# Altium schematic symbol library mySchlib.SchLib: 7 symbols
Pins are listed as number, name and electrical type; pins without a type are passive.

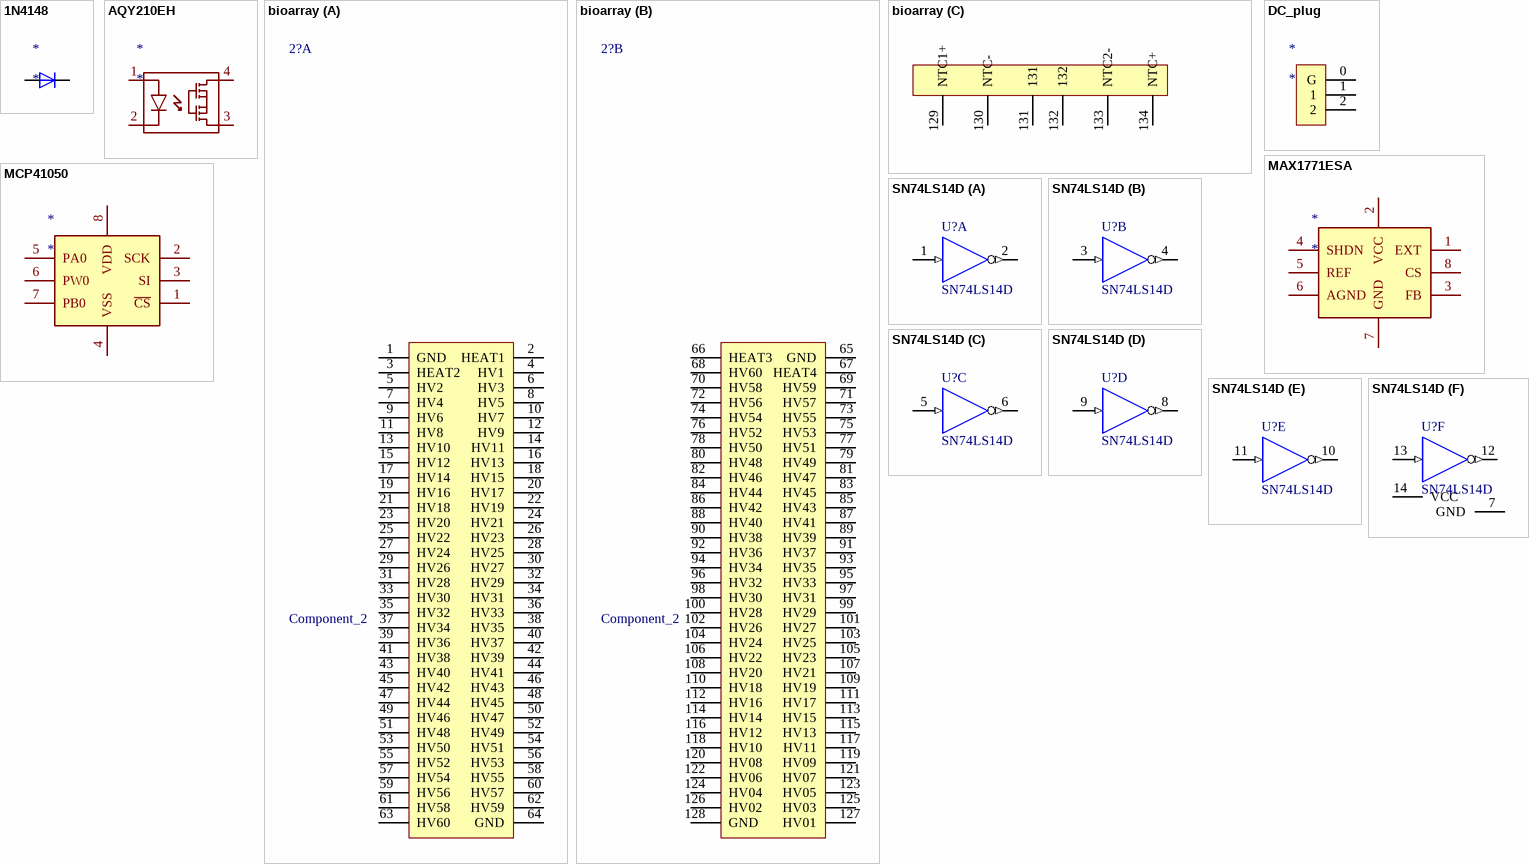
[diagram p0: symbols 1N4148 to SN74LS14D]

## 1N4148
designator *
pins: 1 K, 2 A

## AQY210EH
designator *
pins: 1 A, 2 A, 3 A, 4 A

## bioarray
designator 2?, comment Component_2
footprint PCBComponent_2
footprint PCBComponent_1
part A pins: 1 GND, 2 HEAT1, 3 HEAT2, 4 HV1, 5 HV2, 6 HV3, 7 HV4, 8 HV5, 9 HV6, 10 HV7, 11 HV8, 12 HV9, 13 HV10, 14 HV11, 15 HV12, 16 HV13, 17 HV14, 18 HV15, 19 HV16, 20 HV17, 21 HV18, 22 HV19, 23 HV20, 24 HV21, 25 HV22, 26 HV23, 27 HV24, 28 HV25, 29 HV26, 30 HV27, 31 HV28, 32 HV29, 33 HV30, 34 HV31, 35 HV32, 36 HV33, 37 HV34, 38 HV35, 39 HV36, 40 HV37, 41 HV38, 42 HV39, 43 HV40, 44 HV41, 45 HV42, 46 HV43, 47 HV44, 48 HV45, 49 HV46, 50 HV47, 51 HV48, 52 HV49, 53 HV50, 54 HV51, 55 HV52, 56 HV53, 57 HV54, 58 HV55, 59 HV56, 60 HV57, 61 HV58, 62 HV59, 63 HV60, 64 GND
part B pins: 65 GND, 66 HEAT3, 67 HEAT4, 68 HV60, 69 HV59, 70 HV58, 71 HV57, 72 HV56, 73 HV55, 74 HV54, 75 HV53, 76 HV52, 77 HV51, 78 HV50, 79 HV49, 80 HV48, 81 HV47, 82 HV46, 83 HV45, 84 HV44, 85 HV43, 86 HV42, 87 HV41, 88 HV40, 89 HV39, 90 HV38, 91 HV37, 92 HV36, 93 HV35, 94 HV34, 95 HV33, 96 HV32, 97 HV31, 98 HV30, 99 HV29, 100 HV28, 101 HV27, 102 HV26, 103 HV25, 104 HV24, 105 HV23, 106 HV22, 107 HV21, 108 HV20, 109 HV19, 110 HV18, 111 HV17, 112 HV16, 113 HV15, 114 HV14, 115 HV13, 116 HV12, 117 HV11, 118 HV10, 119 HV09, 120 HV08, 121 HV07, 122 HV06, 123 HV05, 124 HV04, 125 HV03, 126 HV02, 127 HV01, 128 GND
part C pins: 129 NTC1+, 130 NTC-, 131, 132, 133 NTC2-, 134 NTC+

## DC_plug
designator *
pins: 0 G, 1, 2

## MAX1771ESA
designator *
pins: 1 EXT, 2 VCC, 3 FB, 4 SHDN, 5 REF, 6 AGND, 7 GND, 8 CS

## MCP41050
designator *
pins: 1 ~{CS}, 2 SCK, 3 SI, 4 VSS, 5 PA0, 6 PW0, 7 PB0, 8 VDD

## SN74LS14D
designator U?
Hex Schmitt-Trigger Inverter; Published: 8-Jun-2000; LatestRevisionDate: 13-Apr-2006; LatestRevisionNote: IPC-7351 Footprint Added.; DatasheetVersion: Mar-1988; PackageVersion: Jan-1998; PackageReference: D014; Publisher: Altium Limited; PackageDescription: 14-Pin Small Outline Integrated Circuit 1.27 mm Pitch; Code_IPC: SOIC127P600-14; ComponentLink1Description: Manufacturer Link; ComponentLink1URL: http://www.ti.com/; ComponentLink2Description: Datasheet; ComponentLink2URL: http://www-s.ti.com/sc/ds/sn74ls14.pdf
footprint D014_N (SOIC, 14-Leads, Body 8.7x3.9mm, Pitch 1.27mm, IPC Medium Density)
footprint D014_L (SOIC, 14-Leads, Body 8.7x3.9mm, Pitch 1.27mm, IPC High Density)
footprint D014_M (SOIC, 14-Leads, Body 8.7x3.9mm, Pitch 1.27mm, IPC Low Density)
3D model D014 (14-Pin Small Outline Integrated Circuit 1.27 mm Pitch)
simulation model SN74LS14 (SIMCODE)
signal-integrity model SN74LS14D
part A pins: 1 A (in), 2 Y (out)
part B pins: 3 A (in), 4 Y (out)
part C pins: 5 A (in), 6 Y (out)
part D pins: 8 Y (out), 9 A (in)
part E pins: 10 Y (out), 11 A (in)
part F pins: 7 GND, 12 Y (out), 13 A (in), 14 VCC